# Altium schematic symbol library pcie.SCHLIB: 3 symbols
Pins are listed as number, name and electrical type; pins without a type are passive.

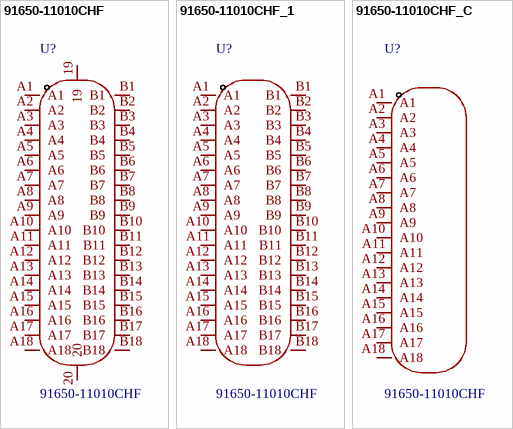
[diagram p0: symbols 91650-11010CHF to 91650-11010CHF_C]

## 91650-11010CHF
designator U?
Manufacturer: UMaxconn(友贸); Add into BOM: yes; Number of Data Pins: 142P; Versions: PCI-E 5.0; Supplementary Features: 带柱; Symbol: 91650-11010CHF; Device: 91650-11010CHF; LCSC Part Name: PCIE5.0 PCI-E SMT 立贴 36PIN (X1) 镀金15u 无卤 CAP; Supplier Part: C5210926; Manufacturer Part: 91650-11010CHF; Supplier Footprint: SMD,P=1mm; JLCPCB Part Class: 扩展库; Datasheet: https://item.szlcsc.com/datasheet/91650-11010CHF/5905330.html; Supplier: LCSC; Convert to PCB: yes; Connector Type: -; Number of Pins: 36P; Mounting Type: 立贴; Height Above Board: 11.25mm; Operating Temperature: -40℃~+85℃
footprint CONN-SMD_36P-P1.00-V_3133
3D model CONN-SMD_36P-L25.0-W8.8-H11.3-P1.00
pins: 19, 20, A1, A2, A3, A4, A5, A6, A7, A8, A9, A10, A11, A12, A13, A14, A15, A16, A17, A18, B1, B2, B3, B4, B5, B6, B7, B8, B9, B10, B11, B12, B13, B14, B15, B16, B17, B18

## 91650-11010CHF_1
designator U?, comment 91650-11010CHF
Manufacturer: UMaxconn(友贸); Add into BOM: yes; Number of Data Pins: 142P; Versions: PCI-E 5.0; Supplementary Features: 带柱; Symbol: 91650-11010CHF; Device: 91650-11010CHF; LCSC Part Name: PCIE5.0 PCI-E SMT 立贴 36PIN (X1) 镀金15u 无卤 CAP; Supplier Part: C5210926; Manufacturer Part: 91650-11010CHF; Supplier Footprint: SMD,P=1mm; JLCPCB Part Class: 扩展库; Datasheet: https://item.szlcsc.com/datasheet/91650-11010CHF/5905330.html; Supplier: LCSC; Convert to PCB: yes; Connector Type: -; Number of Pins: 36P; Mounting Type: 立贴; Height Above Board: 11.25mm; Operating Temperature: -40℃~+85℃
footprint PCIE 1X
3D model CONN-SMD_36P-L25.0-W8.8-H11.3-P1.00
pins: A1, A2, A3, A4, A5, A6, A7, A8, A9, A10, A11, A12, A13, A14, A15, A16, A17, A18, B1, B2, B3, B4, B5, B6, B7, B8, B9, B10, B11, B12, B13, B14, B15, B16, B17, B18

## 91650-11010CHF_C
designator U?, comment 91650-11010CHF
Manufacturer: UMaxconn(友贸); Add into BOM: yes; Number of Data Pins: 142P; Versions: PCI-E 5.0; Supplementary Features: 带柱; Symbol: 91650-11010CHF; Device: 91650-11010CHF; LCSC Part Name: PCIE5.0 PCI-E SMT 立贴 36PIN (X1) 镀金15u 无卤 CAP; Supplier Part: C5210926; Manufacturer Part: 91650-11010CHF; Supplier Footprint: SMD,P=1mm; JLCPCB Part Class: 扩展库; Datasheet: https://item.szlcsc.com/datasheet/91650-11010CHF/5905330.html; Supplier: LCSC; Convert to PCB: yes; Connector Type: -; Number of Pins: 36P; Mounting Type: 立贴; Height Above Board: 11.25mm; Operating Temperature: -40℃~+85℃
footprint CONN-SMD_36P-P1.00-V_3133
3D model CONN-SMD_36P-L25.0-W8.8-H11.3-P1.00
pins: A1, A2, A3, A4, A5, A6, A7, A8, A9, A10, A11, A12, A13, A14, A15, A16, A17, A18